# Altium footprint library CONN08_530470810_MOL.PcbLib: 1 footprints
Each footprint in its own frame and in the unit in brackets; x right, y up, seen from the top. Pads: shape width x height; smd on the part's side, far side on the other; paste and mask are expansions set on the pad; w line width, h text height; cw(c..) or ccw(c..) is an arc to the next point about the centre after c.
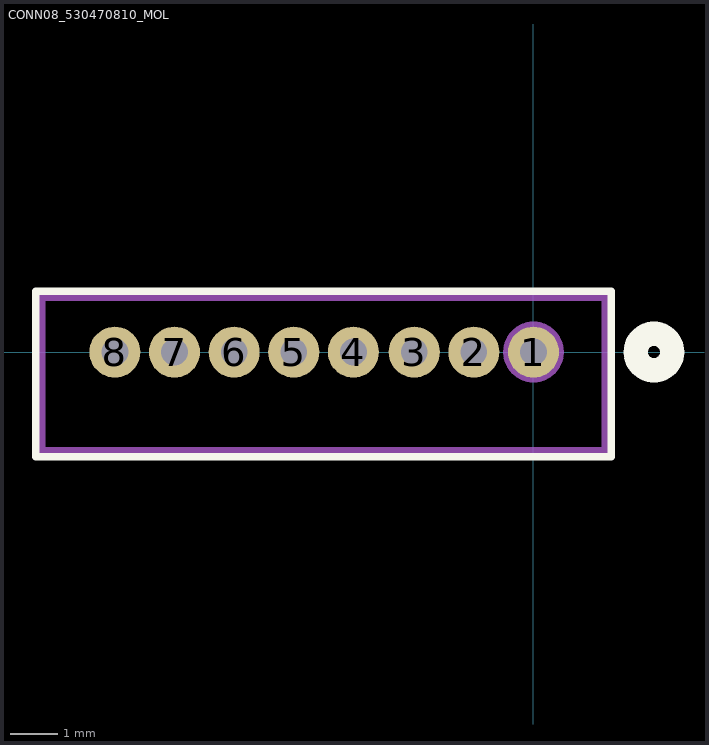
[diagram p0: the footprint, top view; thin cyan lines are the x and y axes]

## CONN08_530470810_MOL [mil]
pads (8):
  round 42 hole 22 mask+4.02: 1(0,0) 2(-49,0) 3(-98,0) 4(-148,0) 5(-197,0) 6(-246,0) 7(-295,0) 8(-344,0)
Top Overlay:
  lines w6: -409,-86 64,-86 64,50 -409,50 -409,-86
  lines w20: 84,0 ccw(c99,0) 114,0 ccw(c99,0) 84,0
Bottom Overlay:
  lines w20: 84,0 ccw(c99,0) 114,0 ccw(c99,0) 84,0
Assembly Top:
  lines w6: -404,-81 59,-81 59,45 -404,45 -404,-81
  lines w20: -15,0 ccw(c0,0) 15,0 ccw(c0,0) -15,0